# Altium footprint library THORLABS_S8060.PcbLib: 1 footprints
Each footprint in its own frame and in the unit in brackets; x right, y up, seen from the top. Pads: shape width x height; smd on the part's side, far side on the other; paste and mask are expansions set on the pad; w line width, h text height; cw(c..) or ccw(c..) is an arc to the next point about the centre after c.
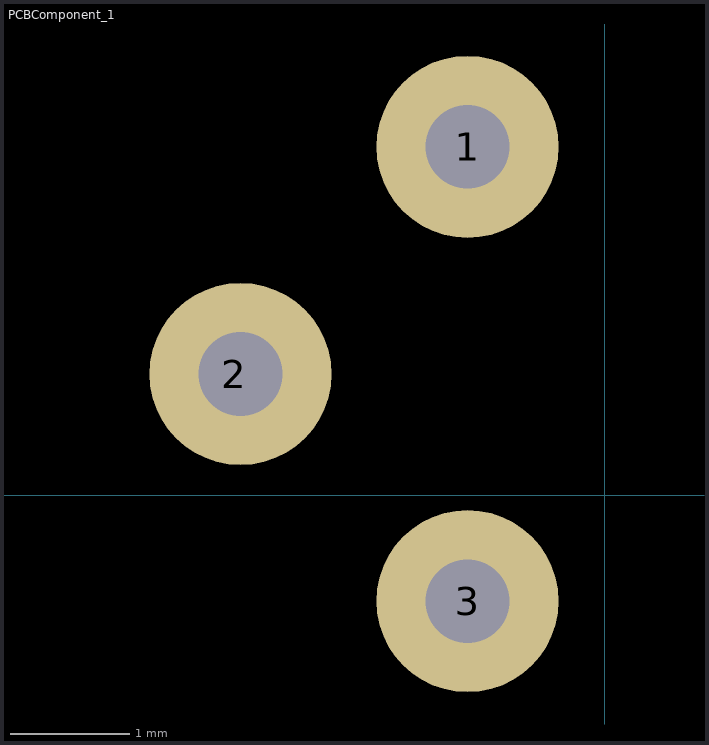
[diagram p0: the footprint, top view; thin cyan lines are the x and y axes]

## PCBComponent_1 [mil]
pads (3):
  round 60 hole 27.56: 1(-45.2,114.8) "2 "(-120,40) 3(-45.2,-34.8)
3D body "S8060-Step.step": height 190, standoff -110.04, extent -170,-85 80,165